# Altium schematic symbol library SMBJ9.0A.SchLib: 1 symbol
Pins are listed as number, name and electrical type; pins without a type are passive.

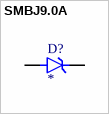
[diagram p0: symbol SMBJ9.0A]

## SMBJ9.0A
designator D?
600W Surface Mount TVS Diode | Littelfuse SMBJ9.0A; SnapEDA_Link: https://www.snapeda.com/parts/SMBJ9.0A/Littelfuse/view-part/?ref=snap; Package: None; Value: *; MF: Littelfuse; MP: SMBJ9.0A; Check_prices: https://www.snapeda.com/parts/SMBJ9.0A/Littelfuse/view-part/?ref=eda
footprint DIOM5436X261N
pins: 1 K, 2 A